# Altium footprint library SMD_7050_2520.PcbLib: 1 footprints
Each footprint in its own frame and in the unit in brackets; x right, y up, seen from the top. Pads: shape width x height; smd on the part's side, far side on the other; paste and mask are expansions set on the pad; w line width, h text height; cw(c..) or ccw(c..) is an arc to the next point about the centre after c.
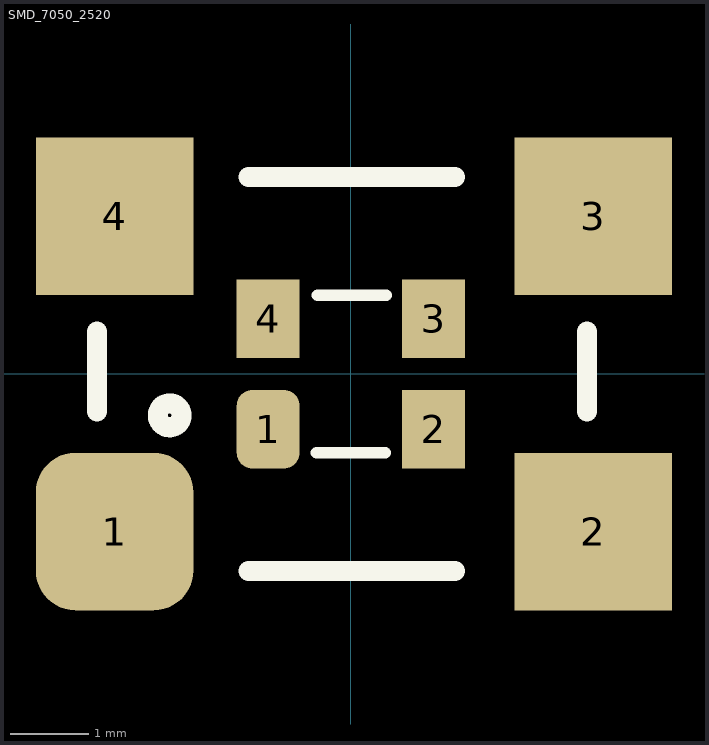
[diagram p0: the footprint, top view; thin cyan lines are the x and y axes]

## SMD_7050_2520 [mm]
pads (8):
  rrect50% 2x2 smd: 1(-3,-2)
  rrect50% 0.8x1 smd: 1(-1.05,-0.7)
  rect 0.8x1 smd: 2(1.05,-0.7) 3(1.05,0.7) 4(-1.05,0.7)
  rect 2x2 smd: 2(3.08,-2) 3(3.08,2) 4(-3,2)
Top Overlay:
  circle w0.254: c-2.3,-0.525 r0.152
  lines w0.15: -0.437,-1 0.437,-1 ; -0.425,1 0.45,1
  lines w0.254: -3.225,-0.476 -3.225,0.54 ; -1.3,-2.5 1.325,-2.5 ; -1.3,2.5 1.325,2.5 ; 3,-0.476 3,0.54
3D body "SMD_7050_Crystall Oscillator.STEP": height 1.52, standoff 0, extent -3.4,-2.52 3.6,2.5